# Altium footprint library 2.00-SOP、SOIC封装.PcbLib: 70 footprints (part 4 of 5)
Each footprint in its own frame and in the unit in brackets; x right, y up, seen from the top. Pads: shape width x height; smd on the part's side, far side on the other; paste and mask are expansions set on the pad; w line width, h text height; cw(c..) or ccw(c..) is an arc to the next point about the centre after c.
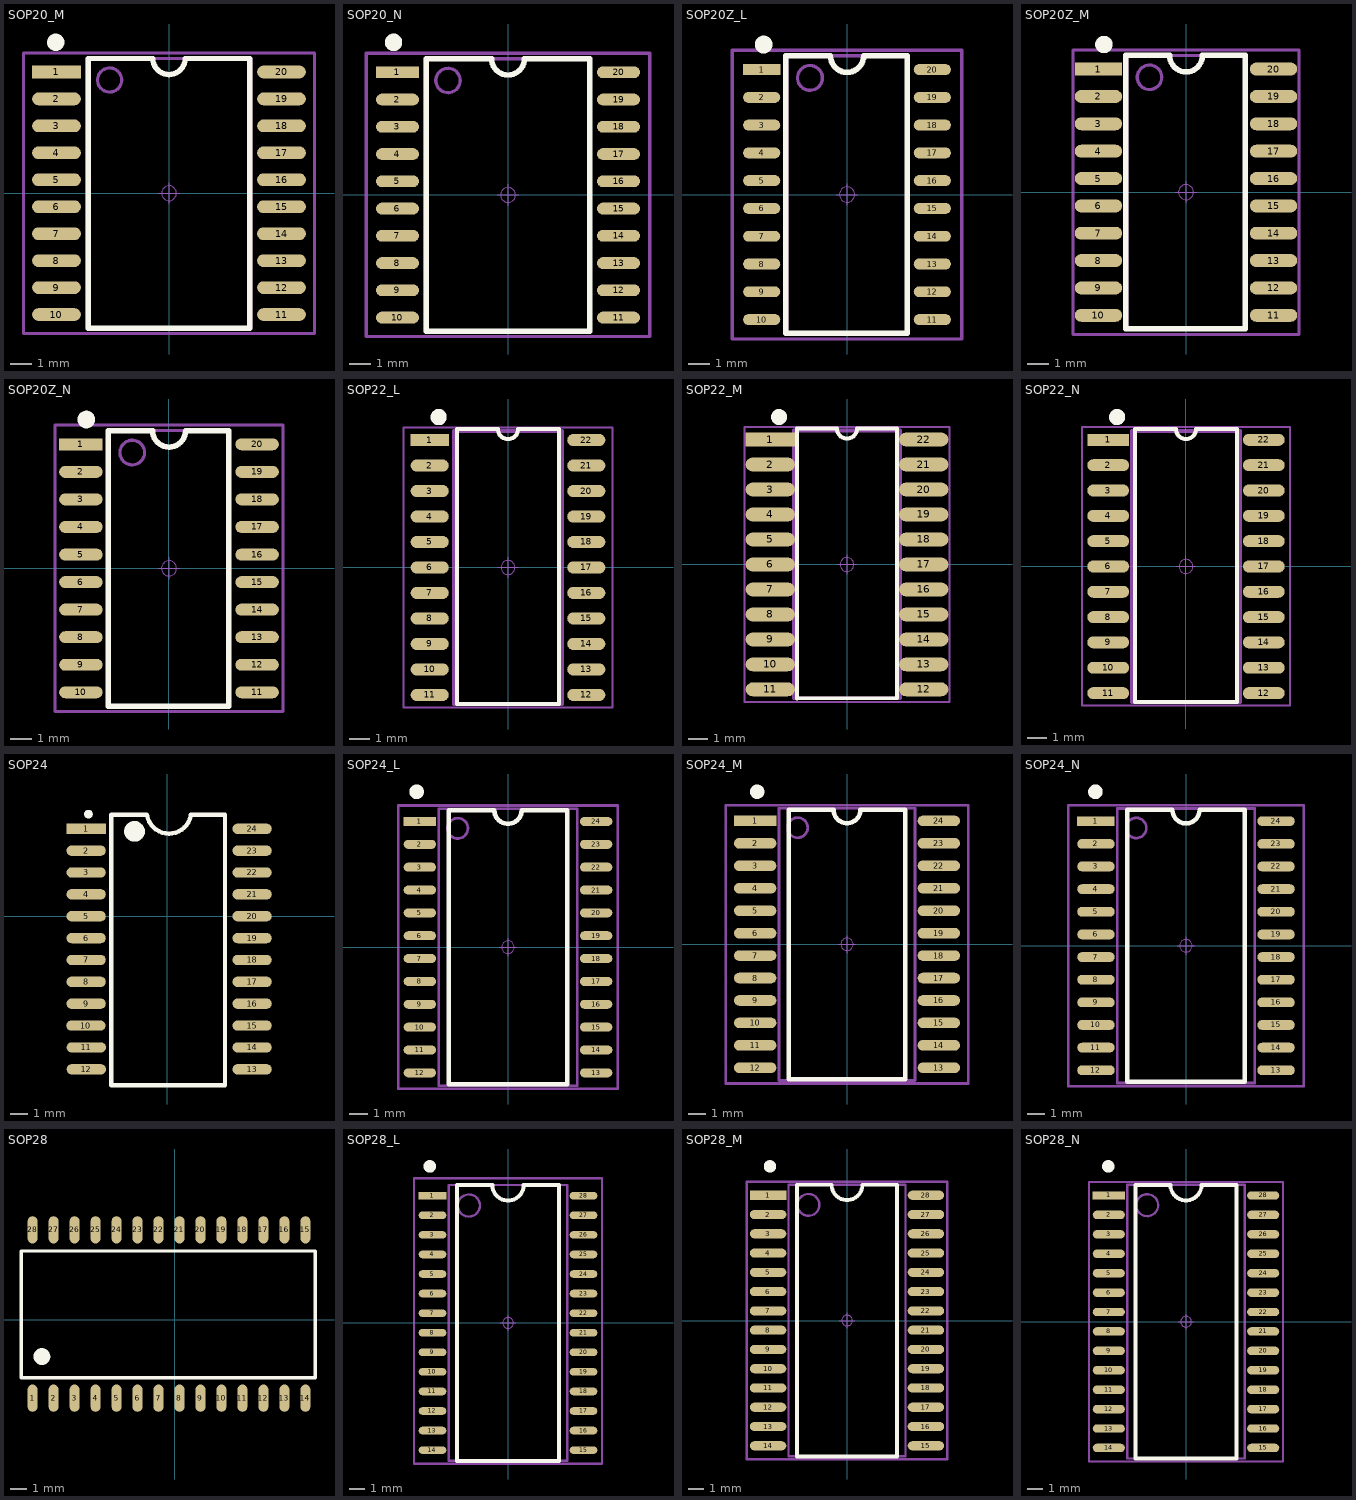
[diagram p3: the footprints below, top view; thin cyan lines are the x and y axes]

## SOP20_M [mm] "13*10.6*2.6（长宽高）封装库来自淘宝卖家 ID：黄晶宝石"
pads (20):
  rect 2.3x0.6 smd: 1(-5.3,5.715)
  oval 2.3x0.6 smd: 2(-5.3,4.445) 3(-5.3,3.175) 4(-5.3,1.905) 5(-5.3,0.635) 6(-5.3,-0.635) 7(-5.3,-1.905) 8(-5.3,-3.175) 9(-5.3,-4.445) 10(-5.3,-5.715) 11(5.3,-5.715) 12(5.3,-4.445) 13(5.3,-3.175) 14(5.3,-1.905) 15(5.3,-0.635) 16(5.3,0.635) 17(5.3,1.905) 18(5.3,3.175) 19(5.3,4.445) 20(5.3,5.715)
Top Overlay:
  circle w0.5: c-5.334,7.112 r0.155
  lines w0.254: -3.81,-6.35 3.81,-6.35 3.81,6.35 0.762,6.35 cw(c0,6.35) 0,5.588 cw(c0,6.35) -0.762,6.35 -3.81,6.35 -3.81,-6.35
Mechanical 13:
  circle w0.15: c-2.797,5.334 r0.568
  lines w0.15: -3.853,-6.35 3.847,-6.35 3.847,6.35 -3.853,6.35 -3.853,-6.35
Mechanical 15:
  circle w0.05: c0,0 r0.35
  lines w0.05: -0.5,0 0.5,0 ; 0,-0.5 0,0.5
  lines w0.15: -6.858,-6.604 -6.858,6.604 6.858,6.604 6.858,-6.604 -6.858,-6.604
3D body "SOP20.STEP": height 2.7, standoff 0, extent -5.153,-6.35 5.153,6.35

## SOP20_N [mm] "13*10.6*2.6（长宽高）封装库来自淘宝卖家 ID：黄晶宝石"
pads (20):
  rect 2x0.55 smd: 1(-5.15,5.715)
  oval 2x0.55 smd: 2(-5.15,4.445) 3(-5.15,3.175) 4(-5.15,1.905) 5(-5.15,0.635) 6(-5.15,-0.635) 7(-5.15,-1.905) 8(-5.15,-3.175) 9(-5.15,-4.445) 10(-5.15,-5.715) 11(5.15,-5.715) 12(5.15,-4.445) 13(5.15,-3.175) 14(5.15,-1.905) 15(5.15,-0.635) 16(5.15,0.635) 17(5.15,1.905) 18(5.15,3.175) 19(5.15,4.445) 20(5.15,5.715)
Top Overlay:
  circle w0.5: c-5.334,7.112 r0.155
  lines w0.254: -3.81,-6.35 3.81,-6.35 3.81,6.35 0.762,6.35 cw(c0,6.35) 0,5.588 cw(c0,6.35) -0.762,6.35 -3.81,6.35 -3.81,-6.35
Mechanical 13:
  circle w0.15: c-2.797,5.334 r0.568
  lines w0.15: -3.853,-6.35 3.847,-6.35 3.847,6.35 -3.853,6.35 -3.853,-6.35
Mechanical 15:
  circle w0.05: c0,0 r0.35
  lines w0.05: -0.5,0 0.5,0 ; 0,-0.5 0,0.5
  lines w0.15: -6.604,-6.604 -6.604,6.604 6.604,6.604 6.604,-6.604 -6.604,-6.604
3D body "SOP20.STEP": height 2.7, standoff 0, extent -5.153,-6.35 5.153,6.35

## SOP20Z_L [mm] "12.5*7.8*2.6（长宽高）窄体"
pads (20):
  rect 1.7x0.5 smd: 1(-3.9,5.715)
  oval 1.7x0.5 smd: 2(-3.9,4.445) 3(-3.9,3.175) 4(-3.9,1.905) 5(-3.9,0.635) 6(-3.9,-0.635) 7(-3.9,-1.905) 8(-3.9,-3.175) 9(-3.9,-4.445) 10(-3.9,-5.715) 11(3.9,-5.715) 12(3.9,-4.445) 13(3.9,-3.175) 14(3.9,-1.905) 15(3.9,-0.635) 16(3.9,0.635) 17(3.9,1.905) 18(3.9,3.175) 19(3.9,4.445) 20(3.9,5.715)
Top Overlay:
  circle w0.5: c-3.81,6.858 r0.155
  lines w0.254: -2.8,-6.35 2.75,-6.35 2.75,6.35 0.765,6.35 cw(c0.003,6.35) 0.003,5.588 cw(c0.003,6.35) -0.759,6.35 -2.8,6.35 -2.8,-6.35
Mechanical 13:
  circle w0.15: c-1.694,5.334 r0.568
  lines w0.15: -2.75,-6.35 2.75,-6.35 2.75,6.35 -2.75,6.35 -2.75,-6.35
Mechanical 15:
  circle w0.05: c0,0 r0.35
  lines w0.05: -0.5,0 0.5,0 ; 0,-0.5 0,0.5
  lines w0.15: -5.25,-6.604 5.25,-6.604 5.25,6.604 -5.25,6.604 -5.25,-6.604
3D body "SOP20窄体.STEP": height 2.7, standoff 0, extent -4.003,-6.25 4.004,6.25

## SOP20Z_M [mm] "12.5*7.8*2.6（长宽高）窄体"
pads (20):
  rect 2.2x0.6 smd: 1(-4.064,5.715)
  oval 2.2x0.6 smd: 2(-4.064,4.445) 3(-4.064,3.175) 4(-4.064,1.905) 5(-4.064,0.635) 6(-4.064,-0.635) 7(-4.064,-1.905) 8(-4.064,-3.175) 9(-4.064,-4.445) 10(-4.064,-5.715) 11(4.064,-5.715) 12(4.064,-4.445) 13(4.064,-3.175) 14(4.064,-1.905) 15(4.064,-0.635) 16(4.064,0.635) 17(4.064,1.905) 18(4.064,3.175) 19(4.064,4.445) 20(4.064,5.715)
Top Overlay:
  circle w0.5: c-3.81,6.858 r0.155
  lines w0.254: -2.8,-6.35 2.75,-6.35 2.75,6.35 0.765,6.35 cw(c0.003,6.35) 0.003,5.588 cw(c0.003,6.35) -0.759,6.35 -2.8,6.35 -2.8,-6.35
Mechanical 13:
  circle w0.15: c-1.694,5.334 r0.568
  lines w0.15: -2.75,-6.35 2.75,-6.35 2.75,6.35 -2.75,6.35 -2.75,-6.35
Mechanical 15:
  circle w0.05: c0,0 r0.35
  lines w0.05: -0.5,0 0.5,0 ; 0,-0.5 0,0.5
  lines w0.15: -5.25,-6.604 5.25,-6.604 5.25,6.604 -5.25,6.604 -5.25,-6.604
3D body "SOP20窄体.STEP": height 2.7, standoff 0, extent -4.003,-6.25 4.004,6.25

## SOP20Z_N [mm] "12.5*7.8*2.6（长宽高）窄体"
pads (20):
  rect 2x0.55 smd: 1(-4.064,5.715)
  oval 2x0.55 smd: 2(-4.064,4.445) 3(-4.064,3.175) 4(-4.064,1.905) 5(-4.064,0.635) 6(-4.064,-0.635) 7(-4.064,-1.905) 8(-4.064,-3.175) 9(-4.064,-4.445) 10(-4.064,-5.715) 11(4.064,-5.715) 12(4.064,-4.445) 13(4.064,-3.175) 14(4.064,-1.905) 15(4.064,-0.635) 16(4.064,0.635) 17(4.064,1.905) 18(4.064,3.175) 19(4.064,4.445) 20(4.064,5.715)
Top Overlay:
  circle w0.5: c-3.81,6.858 r0.155
  lines w0.254: -2.8,-6.35 2.75,-6.35 2.75,6.35 0.765,6.35 cw(c0.003,6.35) 0.003,5.588 cw(c0.003,6.35) -0.759,6.35 -2.8,6.35 -2.8,-6.35
Mechanical 13:
  circle w0.15: c-1.694,5.334 r0.568
  lines w0.15: -2.75,-6.35 2.75,-6.35 2.75,6.35 -2.75,6.35 -2.75,-6.35
Mechanical 15:
  circle w0.05: c0,0 r0.35
  lines w0.05: -0.5,0 0.5,0 ; 0,-0.5 0,0.5
  lines w0.15: -5.25,-6.604 5.25,-6.604 5.25,6.604 -5.25,6.604 -5.25,-6.604
3D body "SOP20窄体.STEP": height 2.7, standoff 0, extent -4.003,-6.25 4.004,6.25

## SOP22_L [mm] "13.6*5.4*1.8mm（长宽高）封装库来自淘宝卖家 ID：黄晶宝石"
height 1.8
pads (22):
  rect 1.9x0.6 smd: 1(-3.9,6.35)
  oval 1.9x0.6 smd: 2(-3.9,5.08) 3(-3.9,3.81) 4(-3.9,2.54) 5(-3.9,1.27) 6(-3.9,0) 7(-3.9,-1.27) 8(-3.9,-2.54) 9(-3.9,-3.81) 10(-3.9,-5.08) 11(-3.9,-6.35) 12(3.9,-6.35) 13(3.9,-5.08) 14(3.9,-3.81) 15(3.9,-2.54) 16(3.9,-1.27) 17(3.9,0) 18(3.9,1.27) 19(3.9,2.54) 20(3.9,3.81) 21(3.9,5.08) 22(3.9,6.35)
Top Overlay:
  circle w0.5: c-3.457,7.493 r0.155
  lines w0.2: -2.549,6.905 -2.549,-6.802 2.549,-6.798 2.549,6.905
  lines w0.203: -2.549,6.905 -0.508,6.905 ccw(c0,6.905) 0,6.397 ccw(c0,6.905) 0.508,6.905 2.549,6.905
Mechanical 13:
  lines w0.2: -2.7,-6.8 2.7,-6.8 2.7,6.8 -2.7,6.8 -2.7,-6.8
Mechanical 15:
  circle w0.05: c0,0 r0.35
  lines w0.05: -0.5,0 0.5,0 ; 0,-0.5 0,0.5
  lines w0.1: -5.207,-6.985 5.207,-6.985 5.207,6.985 -5.207,6.985 -5.207,-6.985
3D body "SOP22.STEP": height 2.1, standoff -0.02, extent -4.053,-6.8 4.053,6.8

## SOP22_M [mm] "13.6*5.4*1.8mm（长宽高）封装库来自淘宝卖家 ID：黄晶宝石"
height 1.8
pads (22):
  rect 2.5x0.7 smd: 1(-3.9,6.35)
  oval 2.5x0.7 smd: 2(-3.9,5.08) 3(-3.9,3.81) 4(-3.9,2.54) 5(-3.9,1.27) 6(-3.9,0) 7(-3.9,-1.27) 8(-3.9,-2.54) 9(-3.9,-3.81) 10(-3.9,-5.08) 11(-3.9,-6.35) 12(3.9,-6.35) 13(3.9,-5.08) 14(3.9,-3.81) 15(3.9,-2.54) 16(3.9,-1.27) 17(3.9,0) 18(3.9,1.27) 19(3.9,2.54) 20(3.9,3.81) 21(3.9,5.08) 22(3.9,6.35)
Top Overlay:
  circle w0.5: c-3.457,7.493 r0.155
  lines w0.2: -2.549,6.905 -2.549,-6.802 2.549,-6.798 2.549,6.905
  lines w0.203: -2.549,6.905 -0.508,6.905 ccw(c0,6.905) 0,6.397 ccw(c0,6.905) 0.508,6.905 2.549,6.905
Mechanical 13:
  lines w0.2: -2.7,-6.8 -2.7,6.8 2.7,6.8 2.7,-6.8 -2.7,-6.8
Mechanical 15:
  circle w0.05: c0,0 r0.35
  lines w0.05: -0.5,0 0.5,0 ; 0,-0.5 0,0.5
  lines w0.1: -5.207,-6.985 -5.207,6.985 5.207,6.985 5.207,-6.985 -5.207,-6.985
3D body "SOP22.STEP": height 2.1, standoff -0.02, extent -4.053,-6.8 4.053,6.8

## SOP22_N [mm] "13.6*5.4*1.8mm（长宽高）"
height 1.8
pads (22):
  rect 2.1x0.6 smd: 1(-3.9,6.35)
  oval 2.1x0.6 smd: 2(-3.9,5.08) 3(-3.9,3.81) 4(-3.9,2.54) 5(-3.9,1.27) 6(-3.9,0) 7(-3.9,-1.27) 8(-3.9,-2.54) 9(-3.9,-3.81) 10(-3.9,-5.08) 11(-3.9,-6.35) 12(3.9,-6.35) 13(3.9,-5.08) 14(3.9,-3.81) 15(3.9,-2.54) 16(3.9,-1.27) 17(3.9,0) 18(3.9,1.27) 19(3.9,2.54) 20(3.9,3.81) 21(3.9,5.08) 22(3.9,6.35)
Top Overlay:
  circle w0.5: c-3.457,7.493 r0.155
  lines w0.2: -2.549,6.905 -2.549,-6.802 2.549,-6.798 2.549,6.905
  lines w0.203: -2.549,6.905 -0.508,6.905 ccw(c0,6.905) 0,6.397 ccw(c0,6.905) 0.508,6.905 2.549,6.905
Mechanical 13:
  lines w0.2: -2.7,-6.8 -2.7,6.8 2.7,6.8 2.7,-6.8 -2.7,-6.8
Mechanical 15:
  circle w0.05: c0,0 r0.35
  lines w0.05: -0.5,0 0.5,0 ; 0,-0.5 0,0.5
  lines w0.1: -5.207,-6.985 -5.207,6.985 5.207,6.985 5.207,-6.985 -5.207,-6.985
3D body "SOP22.STEP": height 2.1, standoff -0.02, extent -4.053,-6.8 4.053,6.8

## SOP24 [mil] "封装库来自淘宝卖家 ID：黄晶宝石"
height 92.91
pads (24):
  rect 90x23.62 smd: 1(-185.5,200)
  oval 90x23.62 smd: 2(-185.5,150) 3(-185.5,100) 4(-185.5,50) 5(-185.5,0) 6(-185.5,-50) 7(-185.5,-100) 8(-185.5,-150) 9(-185.5,-200) 10(-185.9,-250) 11(-185,-300) 12(-185,-350) 13(194,-350) 14(194,-300) 15(194,-250) 16(194,-200) 17(194,-150) 18(194,-100) 19(194,-50) 20(194,0) 21(194,50) 22(194,100) 23(194,150) 24(194,200)
Top Overlay:
  circle w23.62: c-74.81,194 r11.81
  circle w9.84: c-180.12,233.46 r4.92
  lines w10: -47,232.28 -128,232.28 -128,-386 132,-386 132,232.28 54,232.28 ; -46.07,230.07 ccw(c3.97,239.91) 54,230
3D body "SOP24.STEP": height 73, standoff -0.74, extent -206.02,-382 205.99,236

## SOP24_L [mm] "15.4*10.6*2.6mm（长宽高）"
height 10
pads (24):
  rect 1.8x0.5 smd: 1(-4.9,6.985)
  oval 1.8x0.5 smd: 2(-4.9,5.715) 3(-4.9,4.445) 4(-4.9,3.175) 5(-4.9,1.905) 6(-4.9,0.635) 7(-4.9,-0.635) 8(-4.9,-1.905) 9(-4.9,-3.175) 10(-4.9,-4.445) 11(-4.9,-5.715) 12(-4.9,-6.985) 13(4.9,-6.985) 14(4.9,-5.715) 15(4.9,-4.445) 16(4.9,-3.175) 17(4.9,-1.905) 18(4.9,-0.635) 19(4.9,0.635) 20(4.9,1.905) 21(4.9,3.175) 22(4.9,4.445) 23(4.9,5.715) 24(4.9,6.985)
Top Overlay:
  circle w0.5: c-5.08,8.636 r0.155
  lines w0.254: -3.302,-7.62 -3.302,7.62 -0.762,7.62 ccw(c0,7.62) 0.762,7.62 3.302,7.62 3.302,-7.62 -3.302,-7.62
Mechanical 13:
  circle w0.15: c-2.794,6.604 r0.568
  lines w0.15: -3.85,-7.7 3.85,-7.7 3.85,7.7 -3.85,7.7 -3.85,-7.7
Mechanical 15:
  circle w0.05: c0,0 r0.35
  lines w0.05: -0.5,0 0.5,0 ; 0,-0.5 0,0.5
  lines w0.15: -6.096,-7.874 6.096,-7.874 6.096,7.874 -6.096,7.874 -6.096,-7.874
3D body "SOP24.STEP": height 2.7, standoff 0, extent -5.153,-7.7 5.153,7.7

## SOP24_M [mm] "15.4*10.6*2.6mm（长宽高）"
height 10
pads (24):
  rect 2.4x0.6 smd: 1(-5.2,6.985)
  oval 2.4x0.6 smd: 2(-5.2,5.715) 3(-5.2,4.445) 4(-5.2,3.175) 5(-5.2,1.905) 6(-5.2,0.635) 7(-5.2,-0.635) 8(-5.2,-1.905) 9(-5.2,-3.175) 10(-5.2,-4.445) 11(-5.2,-5.715) 12(-5.2,-6.985) 13(5.2,-6.985) 14(5.2,-5.715) 15(5.2,-4.445) 16(5.2,-3.175) 17(5.2,-1.905) 18(5.2,-0.635) 19(5.2,0.635) 20(5.2,1.905) 21(5.2,3.175) 22(5.2,4.445) 23(5.2,5.715) 24(5.2,6.985)
Top Overlay:
  circle w0.5: c-5.08,8.636 r0.155
  lines w0.254: -3.302,-7.62 -3.302,7.62 -0.762,7.62 ccw(c0,7.62) 0.762,7.62 3.302,7.62 3.302,-7.62 -3.302,-7.62
Mechanical 13:
  circle w0.15: c-2.794,6.604 r0.568
  lines w0.15: -3.85,-7.7 -3.85,7.7 3.85,7.7 3.85,-7.7 -3.85,-7.7
Mechanical 15:
  circle w0.05: c0,0 r0.35
  lines w0.05: -0.5,0 0.5,0 ; 0,-0.5 0,0.5
  lines w0.15: -6.858,-7.874 6.858,-7.874 6.858,7.874 -6.858,7.874 -6.858,-7.874
3D body "SOP24.STEP": height 2.7, standoff 0, extent -5.153,-7.7 5.153,7.7

## SOP24_N [mm] "15.4*10.6*2.6mm（长宽高）  淘宝ID:黄晶宝石"
height 10
pads (24):
  rect 2.1x0.55 smd: 1(-5.05,6.985)
  oval 2.1x0.55 smd: 2(-5.05,5.715) 3(-5.05,4.445) 4(-5.05,3.175) 5(-5.05,1.905) 6(-5.05,0.635) 7(-5.05,-0.635) 8(-5.05,-1.905) 9(-5.05,-3.175) 10(-5.05,-4.445) 11(-5.05,-5.715) 12(-5.05,-6.985) 13(5.05,-6.985) 14(5.05,-5.715) 15(5.05,-4.445) 16(5.05,-3.175) 17(5.05,-1.905) 18(5.05,-0.635) 19(5.05,0.635) 20(5.05,1.905) 21(5.05,3.175) 22(5.05,4.445) 23(5.05,5.715) 24(5.05,6.985)
Top Overlay:
  circle w0.5: c-5.08,8.636 r0.155
  lines w0.254: -3.302,-7.62 3.302,-7.62 3.302,7.62 0.762,7.62 cw(c0,7.62) -0.762,7.62 -3.302,7.62 -3.302,-7.62
Mechanical 13:
  circle w0.15: c-2.794,6.604 r0.568
  lines w0.15: -3.85,-7.7 -3.85,7.7 3.85,7.7 3.85,-7.7 -3.85,-7.7
Mechanical 15:
  circle w0.05: c0,0 r0.35
  lines w0.05: -0.5,0 0.5,0 ; 0,-0.5 0,0.5
  lines w0.15: -6.604,-7.874 6.604,-7.874 6.604,7.874 -6.604,7.874 -6.604,-7.874
3D body "SOP24.STEP": height 2.7, standoff 0, extent -5.153,-7.7 5.153,7.7

## SOP28 [mm] "封装库来自淘宝卖家 ID：黄晶宝石"
pads (28):
  oval 0.6x1.65 smd: 1(-8.594,-4.754) 2(-7.324,-4.754) 3(-6.054,-4.754) 4(-4.784,-4.754) 5(-3.514,-4.754) 6(-2.244,-4.754) 7(-0.974,-4.754) 8(0.296,-4.754) 9(1.566,-4.754) 10(2.836,-4.754) 11(4.106,-4.754) 12(5.376,-4.754) 13(6.646,-4.754) 14(7.916,-4.754) 15(7.916,5.431) 16(6.646,5.431) 17(5.376,5.431) 18(4.106,5.431) 19(2.836,5.431) 20(1.566,5.431) 21(0.296,5.431) 22(-0.974,5.431) 23(-2.244,5.431) 24(-3.514,5.431) 25(-4.784,5.431) 26(-6.054,5.431) 27(-7.324,5.431) 28(-8.594,5.431)
Top Overlay:
  circle w0.508: c-8.035,-2.239 r0.254
  lines w0.203: -9.284,4.127 -9.284,-3.514 8.517,-3.514 8.517,4.149 -9.199,4.149
3D body "SO28.STEP": height 2.64, standoff 0, extent -9.421,-4.953 8.659,5.717

## SOP28_L [mm] "17.9*10.6*2.6mm（长宽高）  淘宝ID:黄晶宝石"
pads (28):
  rect 1.8x0.5 smd: 1(-4.9,8.255)
  oval 1.8x0.5 smd: 2(-4.9,6.985) 3(-4.9,5.715) 4(-4.9,4.445) 5(-4.9,3.175) 6(-4.9,1.905) 7(-4.9,0.635) 8(-4.9,-0.635) 9(-4.9,-1.905) 10(-4.9,-3.175) 11(-4.9,-4.445) 12(-4.9,-5.715) 13(-4.9,-6.985) 14(-4.9,-8.255) 15(4.9,-8.255) 16(4.9,-6.985) 17(4.9,-5.715) 18(4.9,-4.445) 19(4.9,-3.175) 20(4.9,-1.905) 21(4.9,-0.635) 22(4.9,0.635) 23(4.9,1.905) 24(4.9,3.175) 25(4.9,4.445) 26(4.9,5.715) 27(4.9,6.985) 28(4.9,8.255)
Top Overlay:
  circle w0.5: c-5.08,10.16 r0.155
  lines w0.254: -3.302,-8.95 3.302,-8.95 3.302,8.95 1.016,8.95 cw(c0,8.95) -1.016,8.95 -3.302,8.95 -3.302,-8.95
Mechanical 13:
  circle w0.15: c-2.54,7.62 r0.718
  lines w0.15: -3.85,-8.95 3.85,-8.95 3.85,8.95 -3.85,8.95 -3.85,-8.95
Mechanical 15:
  circle w0.05: c0,0 r0.35
  lines w0.05: -0.5,0 0.5,0 ; 0,-0.5 0,0.5
  lines w0.15: -6.096,-9.144 6.096,-9.144 6.096,9.398 -6.096,9.398 -6.096,-9.144
3D body "SOP28.STEP": height 2.7, standoff 0, extent -5.153,-8.95 5.153,8.95

## SOP28_M [mm] "17.9*10.6*2.6mm（长宽高）  淘宝ID:黄晶宝石"
pads (28):
  rect 2.4x0.6 smd: 1(-5.2,8.255)
  oval 2.4x0.6 smd: 2(-5.2,6.985) 3(-5.2,5.715) 4(-5.2,4.445) 5(-5.2,3.175) 6(-5.2,1.905) 7(-5.2,0.635) 8(-5.2,-0.635) 9(-5.2,-1.905) 10(-5.2,-3.175) 11(-5.2,-4.445) 12(-5.2,-5.715) 13(-5.2,-6.985) 14(-5.2,-8.255) 15(5.2,-8.255) 16(5.2,-6.985) 17(5.2,-5.715) 18(5.2,-4.445) 19(5.2,-3.175) 20(5.2,-1.905) 21(5.2,-0.635) 22(5.2,0.635) 23(5.2,1.905) 24(5.2,3.175) 25(5.2,4.445) 26(5.2,5.715) 27(5.2,6.985) 28(5.2,8.255)
Top Overlay:
  circle w0.5: c-5.08,10.16 r0.155
  lines w0.254: -3.302,-8.95 3.302,-8.95 3.302,8.95 1.016,8.95 cw(c0,8.95) -1.016,8.95 -3.302,8.95 -3.302,-8.95
Mechanical 13:
  circle w0.15: c-2.54,7.62 r0.718
  lines w0.15: -3.85,-8.95 -3.85,8.95 3.85,8.95 3.85,-8.95 -3.85,-8.95
Mechanical 15:
  circle w0.05: c0,0 r0.35
  lines w0.05: -0.5,0 0.5,0 ; 0,-0.5 0,0.5
  lines w0.15: -6.604,-9.144 6.604,-9.144 6.604,9.144 -6.604,9.144 -6.604,-9.144
3D body "SOP28.STEP": height 2.7, standoff 0, extent -5.153,-8.95 5.153,8.95

## SOP28_N [mm] "17.9*10.6*2.6mm（长宽高）  淘宝ID:黄晶宝石"
pads (28):
  rect 2.1x0.55 smd: 1(-5.05,8.255)
  oval 2.1x0.55 smd: 2(-5.05,6.985) 3(-5.05,5.715) 4(-5.05,4.445) 5(-5.05,3.175) 6(-5.05,1.905) 7(-5.05,0.635) 8(-5.05,-0.635) 9(-5.05,-1.905) 10(-5.05,-3.175) 11(-5.05,-4.445) 12(-5.05,-5.715) 13(-5.05,-6.985) 14(-5.05,-8.255) 15(5.05,-8.255) 16(5.05,-6.985) 17(5.05,-5.715) 18(5.05,-4.445) 19(5.05,-3.175) 20(5.05,-1.905) 21(5.05,-0.635) 22(5.05,0.635) 23(5.05,1.905) 24(5.05,3.175) 25(5.05,4.445) 26(5.05,5.715) 27(5.05,6.985) 28(5.05,8.255)
Top Overlay:
  circle w0.5: c-5.08,10.16 r0.155
  lines w0.254: -3.302,-8.95 3.302,-8.95 3.302,8.95 1.016,8.95 cw(c0,8.95) -1.016,8.95 -3.302,8.95 -3.302,-8.95
Mechanical 13:
  circle w0.15: c-2.54,7.62 r0.718
  lines w0.15: -3.85,-8.95 -3.85,8.95 3.85,8.95 3.85,-8.95 -3.85,-8.95
Mechanical 15:
  circle w0.05: c0,0 r0.35
  lines w0.05: -0.5,0 0.5,0 ; 0,-0.5 0,0.5
  lines w0.15: -6.35,-9.144 6.35,-9.144 6.35,-8.636 6.35,9.144 -6.35,9.144 -6.35,-9.144
3D body "SOP28.STEP": height 2.7, standoff 0, extent -5.153,-8.95 5.153,8.95